# Altium schematic symbol library MP1584EN.SchLib: 1 symbol
Pins are listed as number, name and electrical type; pins without a type are passive.

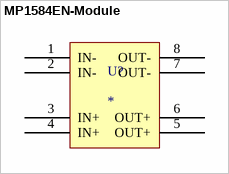
[diagram p0: symbol MP1584EN-Module]

## MP1584EN-Module
designator U?
Buck Converter
footprint MP1584EN (Buck Converter)
pins: 1 IN- (power), 2 IN- (power), 3 IN+ (power), 4 IN+ (power), 5 OUT+ (power), 6 OUT+ (power), 7 OUT- (power), 8 OUT- (power)